# Altium footprint library FootPrintLib_10.PcbLib: 270 footprints (part 17 of 17)
Each footprint in its own frame and in the unit in brackets; x right, y up, seen from the top. Pads: shape width x height; smd on the part's side, far side on the other; paste and mask are expansions set on the pad; w line width, h text height; cw(c..) or ccw(c..) is an arc to the next point about the centre after c.
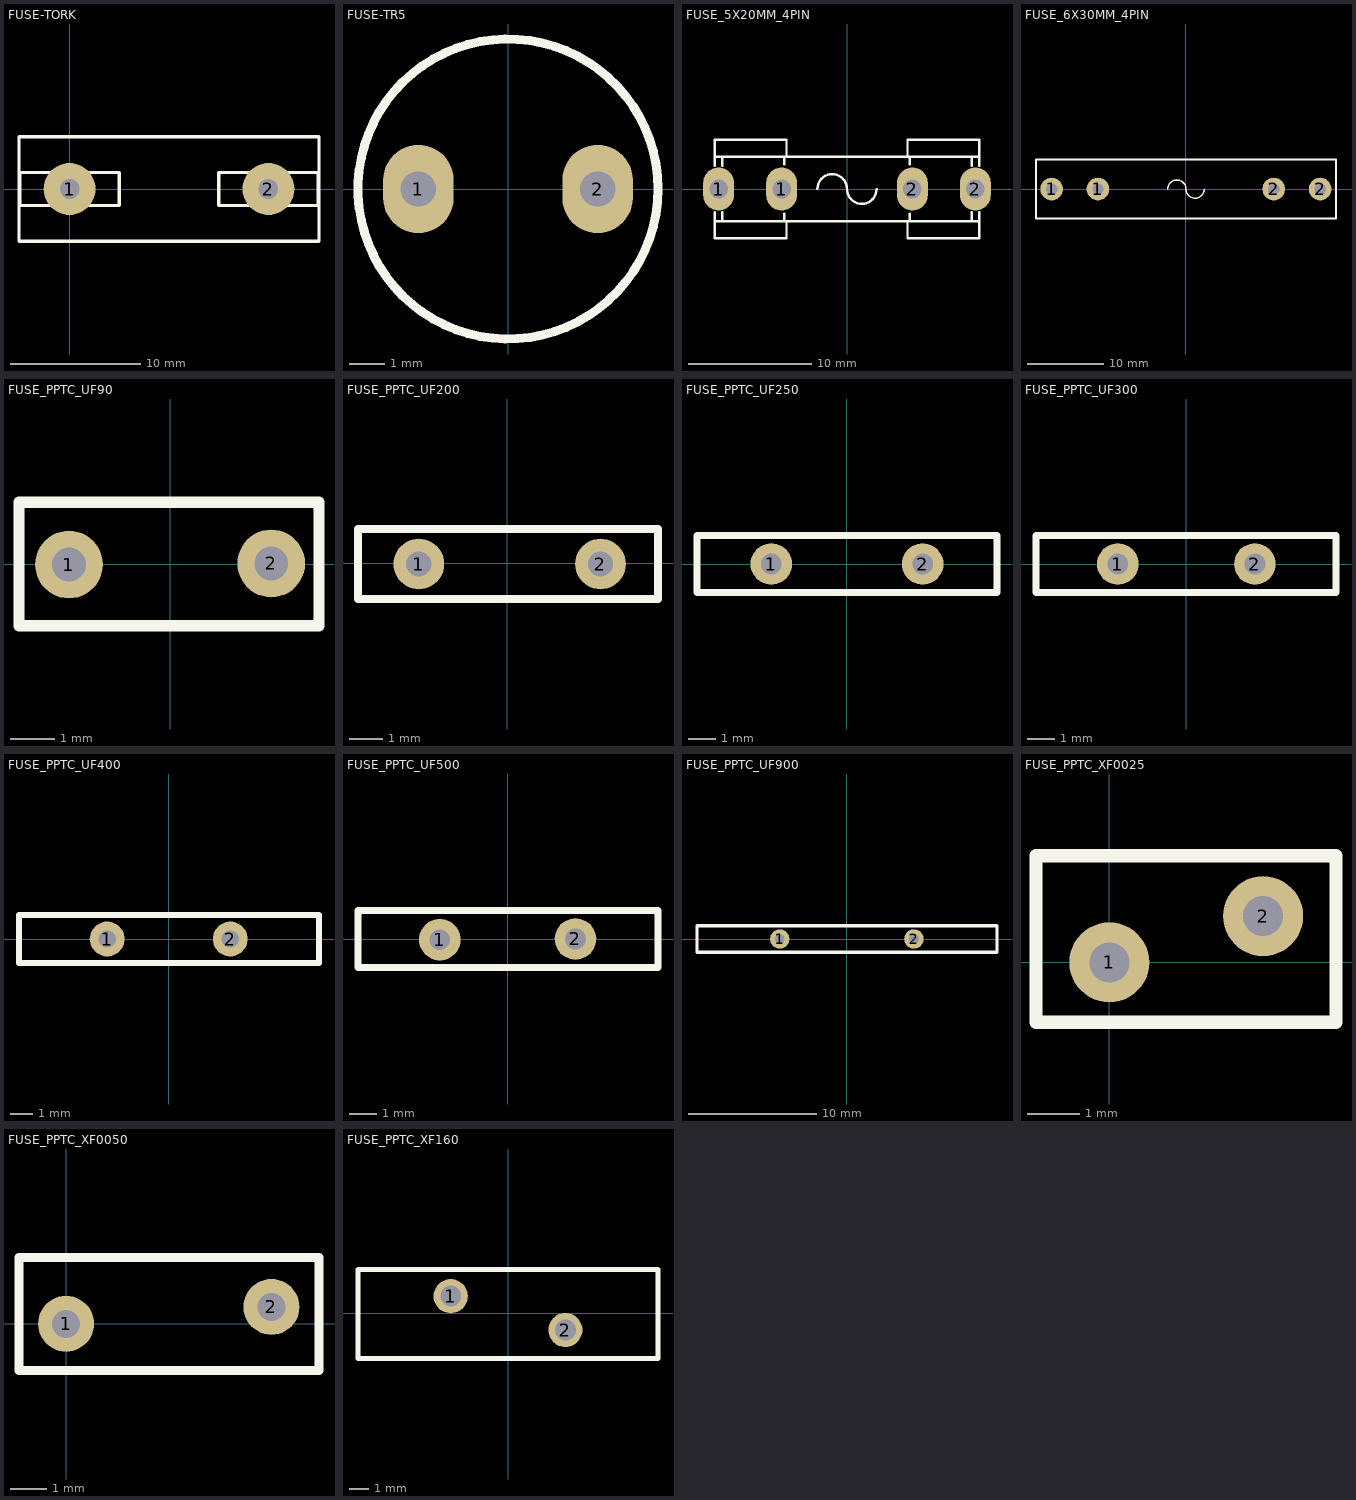
[diagram p16: the footprints below, top view; thin cyan lines are the x and y axes]

## FUSE-TORK [mil]
pads (2):
  round 157 hole 59.06: 1(0,0) 2(600,0)
Top Overlay:
  lines w10: -152.76,-157.48 752.76,-157.48 752.76,157.48 -152.76,157.48 -152.76,-157.48 ; -150,-50 150,-50 150,50 -150,50 -150,-50 ; 450,-50 750,-50 750,50 450,50 450,-50

## FUSE-TR5 [mm] "SUBMINIATURE F USES"
height 8
pads (2):
  oval 2x2.5 hole 1: 1(-2.54,0) 2(2.54,0)
Top Overlay:
  circle w0.254: c0,0 r4.25

## FUSE_5X20MM_4PIN [mm] "Fuse Holder 5x20mm 4 PIN"
height 6
pads (4):
  oval 2.5x3.5 hole 1.5: 1(-10.4,0) 1(-5.3,0) 2(5.3,0) 2(10.4,0)
Top Overlay:
  lines w0.2: -10.7,-2.6 10.7,-2.6 ; -10.7,-1.9 -10.7,-4 -4.9,-4 -4.9,-2.622 ; -10.7,1.9 -10.7,4 -4.9,4 -4.9,2.622 ; -10.7,2.6 10.7,2.6 ; -10.1,-2.6 -10.1,-1.9 ; -10.1,1.9 -10.1,2.6 ; -5.1,-2.6 -5.1,-2 ; -5.1,2 -5.1,2.6 ; -2.4,0 cw(c-1.2,0) 0,0 ccw(c1.2,0) 2.4,0 ; 4.9,-2.622 4.9,-4 10.7,-4 10.7,-1.9 ; 4.9,2.622 4.9,4 10.7,4 10.7,1.9 ; 5.1,-2.6 5.1,-2 ; 5.1,2 5.1,2.6 ; 10.1,-2.6 10.1,-1.9 ; 10.1,1.9 10.1,2.6
3D body "User Library-Fusivel-1.step": height 8.6, standoff 3.4, extent -10,-2.5 10,2.7
3D body "User Library-FH-100.step": height 9.99, standoff -3.5, extent 5.2,-3.5 10.8,3.5
3D body "User Library-FH-100.step": height 9.99, standoff -3.5, extent -10.8,-3.5 -5.2,3.5

## FUSE_6X30MM_4PIN [mm] "Fuse Holder 6x30mm 4 PIN"
pads (4):
  round 3 hole 1.5: 1(-17.71,0) 1(-11.602,0) 2(11.588,0) 2(17.71,0)
Top Overlay:
  lines w0.2: -2.389,0 cw(c-1.189,0) 0.011,0 ccw(c1.211,0) 2.411,0
  lines w0.254: -19.775,-3.9 19.8,-3.9 19.8,3.925 -19.775,3.925 -19.775,-3.9
3D body "FUSE_HOLDER_METAL_PIN.SLDPRT": height 9.02, standoff -3.2, extent -17.812,-3.302 -11.538,3.198
3D body "FUSE_HOLDER_METAL_PIN.SLDPRT": height 9.02, standoff -3.2, extent 11.437,-3.25 17.71,3.25
3D body "GLASS_FUSE_30x6mm_BIG.SLDPRT": height 7.45, standoff 1.55, extent -15.145,-2.95 14.955,2.95

## FUSE_PPTC_UF90 [mil]
pads (2):
  round 60 hole 30: 1(-89.57,-0.49) 2(89.57,0.49)
Top Overlay:
  lines w10: -133.86,-54.63 131.89,-54.63 131.89,54.63 -133.86,54.63 -133.86,-54.63
3D body "PPTC_UF090.SLDPRT": height 472.44, standoff -392.41, extent -108.27,-41.83 108.27,40.85

## FUSE_PPTC_UF200 [mil]
pads (2):
  round 60 hole 30: 1(-104.33,-0.98) 2(110.24,-0.98)
Top Overlay:
  lines w10: -176.18,-42.32 -176.18,40.35 178.15,40.35 178.15,-42.32 -176.18,-42.32
3D body "PPTC_UF200.SLDPRT": height 531.5, standoff -381.89, extent -176.18,-42.32 178.15,40.35

## FUSE_PPTC_UF250 [mil]
pads (2):
  round 60 hole 30: 1(-109.25,0) 2(109.25,0)
Top Overlay:
  lines w10: -216.54,-41.34 216.54,-41.34 216.54,41.34 -216.54,41.34 -216.54,-41.34
3D body "PPTC_UF250.SLDPRT": height 610.24, standoff -482.28, extent -216.53,-41.34 216.53,41.34

## FUSE_PPTC_UF300 [mil]
pads (2):
  round 60 hole 30: 1(-98.92,0) 2(98.92,0)
Top Overlay:
  lines w10: -217.03,-41.34 -217.03,41.34 216.04,41.34 216.04,-41.34 -217.03,-41.34
3D body "PPTC_UF300.SLDPRT": height 570.87, standoff -393.7, extent -217.03,-41.34 216.04,41.34

## FUSE_PPTC_UF400 [mil]
pads (2):
  round 60 hole 30: 1(-105.81,0) 2(105.81,0)
Top Overlay:
  lines w10: -257.38,-41.34 -257.38,41.34 258.37,41.34 258.37,-41.34 -257.38,-41.34
3D body "PPTC_UF400.SLDPRT": height 629.92, standoff -413.39, extent -256.88,-40.35 258.87,42.33

## FUSE_PPTC_UF500 [mil]
pads (2):
  round 60 hole 30: 1(-97.93,-0.49) 2(97.93,0.49)
Top Overlay:
  lines w10: -216.04,-40.85 217.03,-40.85 217.03,41.83 -216.04,41.83 -216.04,-40.85
3D body "PPTC_UF500.SLDPRT": height 551.18, standoff -413.39, extent -216.04,-40.84 217.03,41.84

## FUSE_PPTC_UF900 [mil]
pads (2):
  round 60 hole 30: 1(-206.69,0) 2(206.69,0)
Top Overlay:
  lines w10: -461.61,-40.94 -461.61,40.94 462.6,40.94 462.6,-40.94 -461.61,-40.94
3D body "PPTC_UF900.SLDPRT": height 1015.75, standoff -460.63, extent -462.32,-37.36 462.88,37.44

## FUSE_PPTC_XF0025 [mil]
pads (2):
  round 60 hole 30: 1(0,0) 2(115.35,34.65)
Top Overlay:
  lines w10: -55,-45 -55,80 170,80 170,-45 -55,-45
3D body "PPTC_XF0025.SLDPRT": height 255.78, standoff -119.61, extent -40.55,-5.9 156.3,37.41

## FUSE_PPTC_XF0050 [mil]
pads (2):
  round 60 hole 30: 1(0,0) 2(220.08,18.11)
Top Overlay:
  lines w10: -50.39,-50 271,-50 271,71 -50.39,71 -50.39,-50
3D body "PPTC_XF0050.SLDPRT": height 387.8, standoff -374.29, extent -22.04,-11.02 241.74,28.35

## FUSE_PPTC_XF160 [mm]
pads (2):
  round 1.8 hole 1.1: 1(-3.015,0.89) 2(3.015,-0.89)
Top Overlay:
  lines w0.254: -7.89,-2.385 -7.89,2.29 7.885,2.29 7.885,-2.385 -7.89,-2.385
3D body "PPTC_XF160.SLDPRT": height 17.5, standoff -10, extent -7.505,-1.41 7.495,1.39